# Altium schematic symbol library BMI160.SchLib: 1 symbol
Pins are listed as number, name and electrical type; pins without a type are passive.

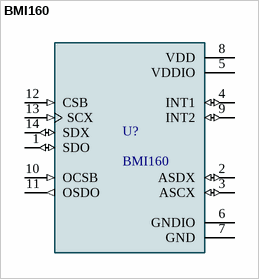
[diagram p0: symbol BMI160]

## BMI160
designator U?
Accelerometer, Gyroscope, 6 Axis Sensor IÂ²C, SPI Output; Package: None; Price: None; Availability: Unavailable; MP: BMI160; Value: *
footprint BMI160 (PQFN50P250X300X88-14N)
pins: 1 SDO (io), 2 ASDX (io), 3 ASCX (io), 4 INT1 (io), 5 VDDIO (power), 6 GNDIO, 7 GND, 8 VDD (power), 9 INT2 (io), 10 OCSB (in), 11 OSDO (out), 12 CSB (in), 13 SCX (in), 14 SDX (io)